# Altium schematic symbol library 1935776.SchLib: 1 symbol
Pins are listed as number, name and electrical type; pins without a type are passive.

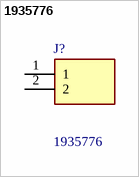
[diagram p0: symbol 1935776]

## 1935776
designator J?
Fixed Terminal Blocks PT 2.5/ 2-5.0-H g; Manufacturer_Name: Phoenix Contact; Geometry.Height: 13.65mm; Manufacturer_Part_Number: 1935776; Mouser Part Number: 651-1935776; Mouser Price/Stock: https://www.mouser.co.uk/ProductDetail/Phoenix-Contact/1935776?qs=gjk32EaArKJ3oesOAo3TWA%3D%3D; Arrow Part Number: 1935776; Arrow Price/Stock: https://www.arrow.com/en/products/1935776/phoenix-contact?region=nac; Datasheet Link: https://datasheet.datasheetarchive.com/originals/distributors/SFDatasheet-2/sf-00057493.pdf
footprint 1935776
pins: 1, 2